# Altium footprint library custom-case.PcbLib: 483 footprints (part 13 of 31)
Each footprint in its own frame and in the unit in brackets; x right, y up, seen from the top. Pads: shape width x height; smd on the part's side, far side on the other; paste and mask are expansions set on the pad; w line width, h text height; cw(c..) or ccw(c..) is an arc to the next point about the centre after c.
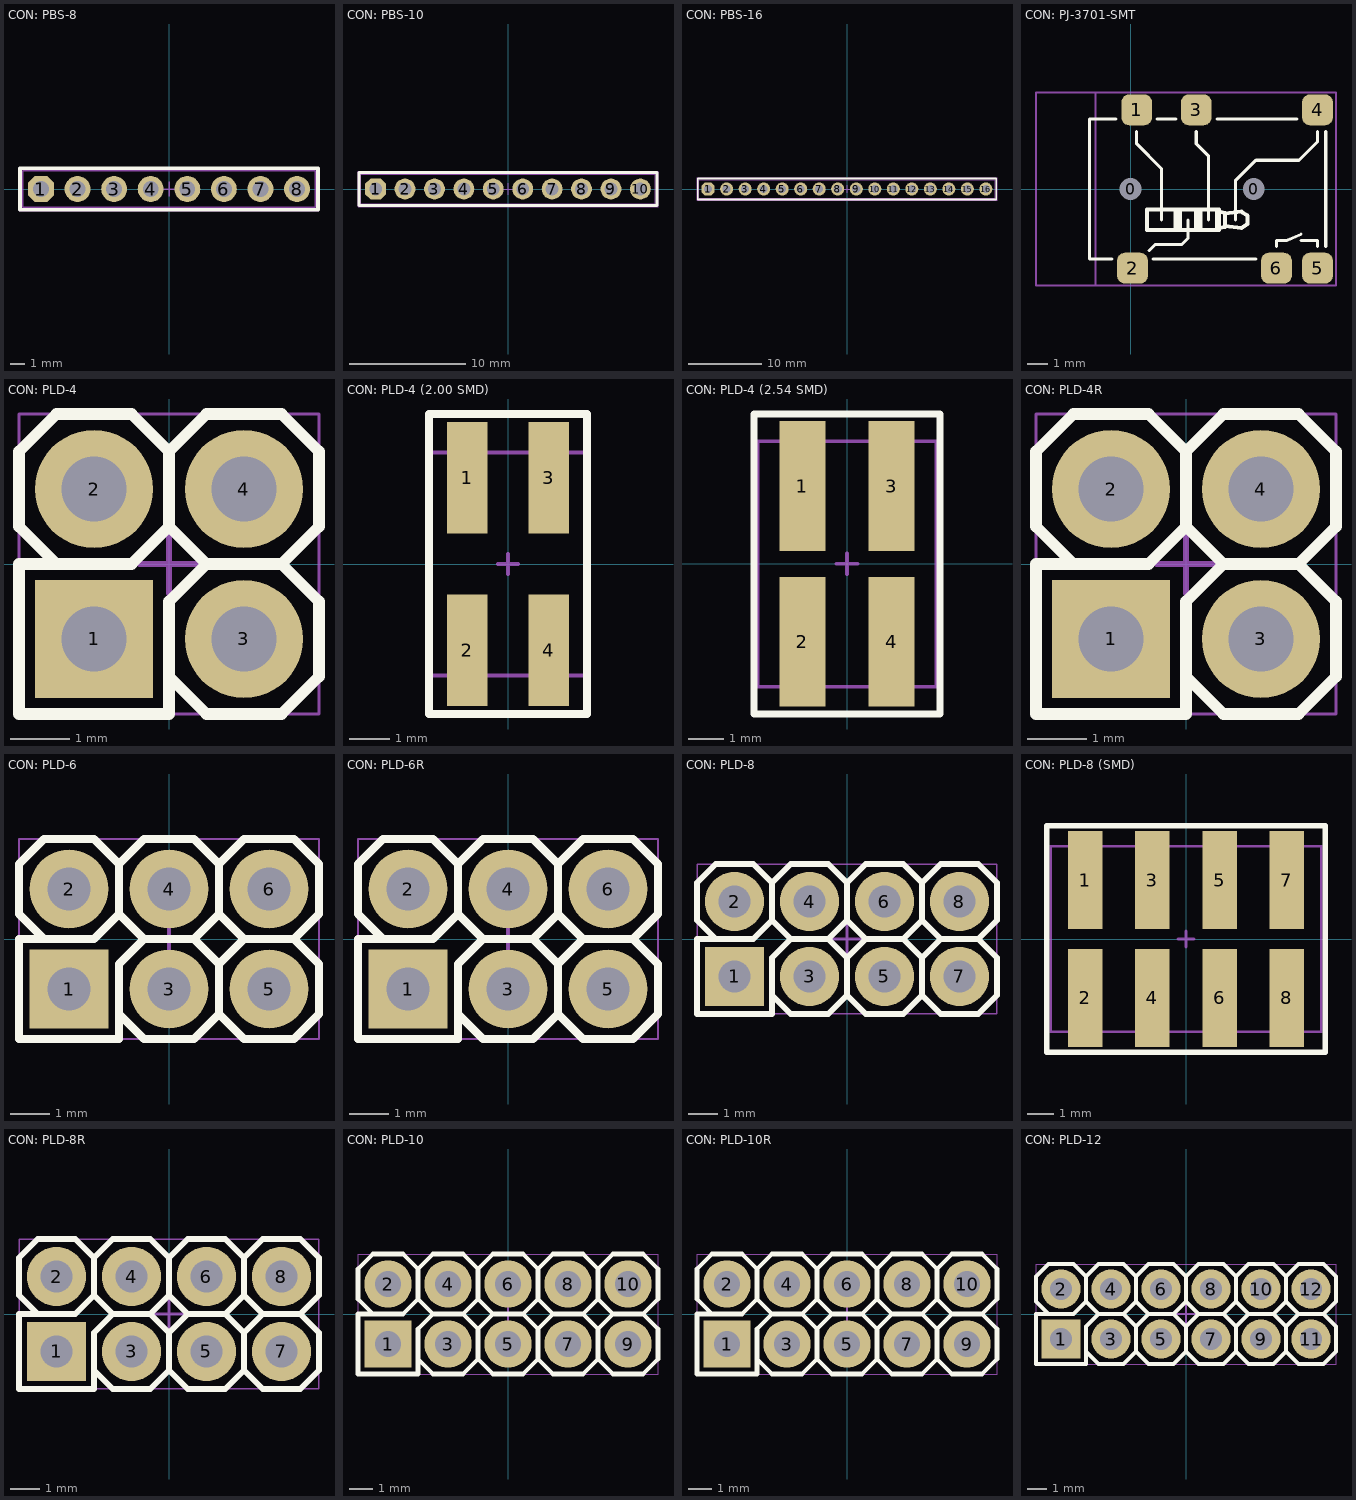
[diagram p12: the footprints below, top view; thin cyan lines are the x and y axes]

## CON: PBS-8 [mm] "PBS-8"
height 10
pads (8):
  oct 1.8x1.8 hole 1.1: 1(-8.89,0)
  round 1.8 hole 1.1: 2(-6.35,0) 3(-3.81,0) 4(-1.27,0) 5(1.27,0) 6(3.81,0) 7(6.35,0) 8(8.89,0)
Top Overlay:
  lines w0.254: -10.35,-1.45 10.35,-1.45 10.35,1.45 -10.35,1.45 -10.35,-1.45
Top Assy:
  lines w0.1: -10.16,-1.27 10.16,-1.27 10.16,1.27 -10.16,1.27 -10.16,-1.27
Size Area:
  lines w0.05: -10.414,-1.524 -10.414,1.524 10.414,1.524 10.414,-1.524 -10.414,-1.524
  lines w0.1: -0.5,0 0.5,0 ; 0,-0.5 0,0.5
3D body "User Library-PBS-08.STEP": height 8.4, standoff -3.2, extent -10.16,-1.27 10.16,1.27

## CON: PBS-10 [mm] "PBS-10"
height 8.5
pads (10):
  oct 1.8x1.8 hole 1.1: 1(-11.43,0)
  round 1.8 hole 1.1: 2(-8.89,0) 3(-6.35,0) 4(-3.81,0) 5(-1.27,0) 6(1.27,0) 7(3.81,0) 8(6.35,0) 9(8.89,0) 10(11.43,0)
Top Overlay:
  lines w0.254: -12.875,-1.425 12.875,-1.425 12.875,1.425 -12.875,1.425 -12.875,-1.425
Top Assy:
  lines w0.1: -12.7,-1.27 -12.7,1.27 12.7,1.27 12.7,-1.27 -12.7,-1.27
Size Area:
  lines w0.05: -12.954,-1.524 12.954,-1.524 12.954,1.524 -12.954,1.524 -12.954,-1.524
  lines w0.1: -0.5,0 0.5,0 ; 0,-0.5 0,0.5
3D body "User Library-PBS-10.STEP": height 8.4, standoff -3.2, extent -12.7,-1.27 12.7,1.27

## CON: PBS-16 [mm] "PBS-16"
height 10
pads (16):
  oct 1.8x1.8 hole 1.1: 1(-19.05,0)
  round 1.8 hole 1.1: 2(-16.51,0) 3(-13.97,0) 4(-11.43,0) 5(-8.89,0) 6(-6.35,0) 7(-3.81,0) 8(-1.27,0) 9(1.27,0) 10(3.81,0) 11(6.35,0) 12(8.89,0) 13(11.43,0) 14(13.97,0) 15(16.51,0) 16(19.05,0)
Top Overlay:
  lines w0.254: -20.475,-1.425 20.475,-1.425 20.475,1.425 -20.475,1.425 -20.475,-1.425
Top Assy:
  lines w0.1: -20.32,-1.27 -20.32,1.27 20.32,1.27 20.32,-1.27 -20.32,-1.27
Size Area:
  lines w0.05: -20.574,-1.524 20.574,-1.524 20.574,1.524 -20.574,1.524 -20.574,-1.524
  lines w0.1: -0.5,0 0.5,0 ; 0,-0.5 0,0.5
3D body "User Library-pbs-16.STEP": height 8.27, standoff -2.73, extent -20.32,-1.27 20.32,1.27

## CON: PJ-3701-SMT [mm] "Mini Jack"
pads (8):
  round 1 hole 1.05 unplated: 0(0,0) 0(6,0)
  rrect50% 1.5x1.5 smd: 1(0.3,3.85) 2(0.1,-3.85) 3(3.2,3.85) 4(9.1,3.85) 5(9.1,-3.85) 6(7.1,-3.85)
Top Overlay:
  lines w0.15: -0.9,-3.4 -2,-3.4 -2,3.4 -0.7,3.4 ; 0.3,2.8 0.3,2.2 1.5,1 1.5,-1.5 ; 0.9,-3 1.2,-2.7 2.5,-2.7 2.8,-2.4 ; 1.1,-3.4 6.1,-3.4 ; 1.3,3.4 2.2,3.4 ; 2.8,-1.5 2.8,-2.4 ; 3.2,2.8 3.2,2.2 3.8,1.6 3.8,-1.5 ; 4.2,3.4 8.1,3.4 ; 5.1,-1.5 5.1,0.4 6.1,1.4 8.2,1.4 9.1,2.3 9.1,2.8 ; 7.1,-2.8 7.1,-2.5 7.6,-2.5 8.3,-2.2 ; 8.3,-2.5 9.1,-2.5 9.1,-2.8 ; 9.5,-2.8 9.5,2.8 ; 2.8,-2.4 2.8,-2.4
  lines w0.2: 2.2,-2 2.2,-1 ; 2.4,-2 2.4,-1 ; 3.2,-2 3.2,-1 ; 3.4,-2 3.4,-1 ; 4.2,-2 4.2,-1 ; 4.3,-1.9 4.6,-1.84 4.6,-1.16 4.3,-1.1 4.3,-2 3.3,-2 ; 4.3,-1 3.3,-1 ; 4.6,-1.8 5.4,-1.9 5.7,-1.7 5.7,-1.3 5.4,-1.1 4.6,-1.2 ; 2.3,-2 3.3,-2 ; 2.3,-2 2.3,-1 ; 2.3,-2 0.8,-2 0.8,-1 2.3,-1 ; 2.3,-1 3.3,-1 ; 3.3,-2 3.3,-1
3D model:
  lines w0.1: -1.7,-4.7 -1.7,4.7 10,4.7 10,-4.7 -1.7,-4.7
Size Area:
  lines w0.1: -4.6,-4.7 10,-4.7 10,4.7 -4.6,4.7 -4.6,-4.7
3D body "PJ-3701-SMT.STEP": height 4.7, standoff -0.6, extent -4.6,-4.17 9.5,4.23

## CON: PLD-4 [mm]
height 10
pads (4):
  rect 2x2 hole 1.1: 1(-1.27,-1.27)
  round 2 hole 1.1: 2(-1.27,1.27) 3(1.27,-1.27) 4(1.27,1.27)
Top Overlay:
  lines w0.2: -1.905,0 -2.54,0.635 -2.54,1.905 -1.905,2.54 ; 0,-1.905 0.635,-2.54 1.905,-2.54 2.54,-1.905 2.54,-0.635 1.905,0 ; -1.905,2.54 -0.635,2.54 ; -1.905,2.54 -0.635,2.54 ; -1.905,2.54 -0.635,2.54 ; -0.635,2.54 0,1.905 ; 0,0.635 0.635,0 ; 0,0.635 0,1.905 ; 0,0.635 -0.635,0 -2.54,0 -2.54,-2.54 0,-2.54 0,-0.635 0.635,0 ; 0,1.905 0.635,2.54 ; 0.635,0 1.905,0 ; 0.635,2.54 1.905,2.54 ; 0.635,2.54 1.905,2.54 ; 1.905,0 2.54,0.635 2.54,1.905 1.905,2.54
Top Assy:
  lines w0.1: -1.905,0 -2.54,0.635 -2.54,1.905 -1.905,2.54 -0.635,2.54 0,1.905 0.635,2.54 1.905,2.54 2.54,1.905 2.54,0.635 1.905,0 ; 0,-1.905 0.635,-2.54 1.905,-2.54 2.54,-1.905 2.54,-0.635 1.905,0 ; 0.635,0 0,-0.635 0,-2.54 -2.54,-2.54 -2.54,0 -0.635,0 0,0.635 0.635,0 ; 0.635,0 1.905,0
Size Area:
  lines w0.05: -2.54,-2.54 -2.54,2.54 2.54,2.54 2.54,-2.54 -2.54,-2.54
  lines w0.1: -0.5,0 0.5,0 ; 0,-0.5 0,0.5
3D body "PLD-4.STEP": height 8.54, standoff -3, extent -2.592,-2.546 2.488,2.534

## CON: PLD-4 (2.00 SMD) [mm]
pads (4):
  rect 1x2.75 smd: 1(-1,2.125) 2(-1,-2.125) 3(1,2.125) 4(1,-2.125)
Top Overlay:
  lines w0.2: -1.95,-3.7 -1.95,3.7 1.95,3.7 1.95,-3.7 -1.95,-3.7
Top Assy:
  lines w0.1: -1.95,-2.75 -1.95,2.75 1.95,2.75 1.95,-2.75 -1.95,-2.75
Size Area:
  lines w0.1: -0.25,0 0.25,0 ; 0,-0.25 0,0.25 ; -1.95,-3.7 1.95,-3.7 1.95,3.7 -1.95,3.7 -1.95,-3.7
3D body "877590464-1.STEP": height 6.5, standoff 0, extent -1.95,-2.75 1.95,2.75

## CON: PLD-4 (2.54 SMD) [mm]
pads (4):
  rect 1.3x3.7 smd: 1(-1.27,2.22) 2(-1.27,-2.22) 3(1.27,2.22) 4(1.27,-2.22)
Top Overlay:
  lines w0.2: -2.65,-4.275 2.65,-4.275 2.65,4.275 -2.65,4.275 -2.65,-4.275
Top Assy:
  lines w0.1: -2.55,-3.5 -2.55,3.5 2.55,3.5 2.55,-3.5 -2.55,-3.5
Size Area:
  lines w0.1: -0.3,0 0.3,0 ; 0,-0.3 0,0.3 ; -2.65,-4.278 -2.65,4.275 2.65,4.275 2.65,-4.253 -2.65,-4.278
3D body "015912040-1.STEP": height 9.64, standoff -0.01, extent -2.54,-3.492 2.54,3.493

## CON: PLD-4R [mm]
height 10
pads (4):
  rect 2x2 hole 1.1: 1(-1.27,-1.27)
  round 2 hole 1.1: 2(-1.27,1.27) 3(1.27,-1.27) 4(1.27,1.27)
Top Overlay:
  lines w0.2: -1.905,0 -2.54,0.635 -2.54,1.905 -1.905,2.54 ; 0,-1.905 0.635,-2.54 1.905,-2.54 2.54,-1.905 2.54,-0.635 1.905,0 ; -1.905,2.54 -0.635,2.54 ; -1.905,2.54 -0.635,2.54 ; -1.905,2.54 -0.635,2.54 ; -0.635,2.54 0,1.905 ; 0,0.635 0.635,0 ; 0,0.635 0,1.905 ; 0,0.635 -0.635,0 -2.54,0 -2.54,-2.54 0,-2.54 0,-0.635 0.635,0 ; 0,1.905 0.635,2.54 ; 0.635,0 1.905,0 ; 0.635,2.54 1.905,2.54 ; 0.635,2.54 1.905,2.54 ; 1.905,0 2.54,0.635 2.54,1.905 1.905,2.54
Top Assy:
  lines w0.1: -1.905,0 -2.54,0.635 -2.54,1.905 -1.905,2.54 -0.635,2.54 0,1.905 0.635,2.54 1.905,2.54 2.54,1.905 2.54,0.635 1.905,0 ; 0,-1.905 0.635,-2.54 1.905,-2.54 2.54,-1.905 2.54,-0.635 1.905,0 ; 0.635,0 0,-0.635 0,-2.54 -2.54,-2.54 -2.54,0 -0.635,0 0,0.635 0.635,0 ; 0.635,0 1.905,0
Size Area:
  lines w0.05: -2.54,-2.54 -2.54,2.54 2.54,2.54 2.54,-2.54 -2.54,-2.54
  lines w0.1: -0.5,0 0.5,0 ; 0,-0.5 0,0.5
3D body "2x2 Male Pin Header Angle.STEP": height 5.1, standoff -2.9, extent -2.54,-1.61 2.545,13.29

## CON: PLD-6 [mm]
height 10
pads (6):
  rect 2x2 hole 1.1: 1(-2.54,-1.27)
  round 2 hole 1.1: 2(-2.54,1.27) 3(0,-1.27) 4(0,1.27) 5(2.54,-1.27) 6(2.54,1.27)
Top Overlay:
  lines w0.2: -3.175,0 -3.81,0.635 -3.81,1.905 -3.175,2.54 ; -1.27,-1.905 -0.635,-2.54 0.635,-2.54 1.27,-1.905 ; -3.175,2.54 -1.905,2.54 ; -3.175,2.54 -1.905,2.54 ; -3.175,2.54 -1.905,2.54 ; -1.905,2.54 -1.27,1.905 ; -1.27,0.635 -1.27,1.905 ; -1.27,0.635 -1.905,0 -3.81,0 -3.81,-2.54 -1.27,-2.54 -1.27,-0.635 -0.635,0 ; -1.27,0.635 -0.635,0 ; -1.27,1.905 -0.635,2.54 ; -0.635,0 0.635,0 ; -0.635,2.54 0.635,2.54 ; -0.635,2.54 0.635,2.54 ; 0.635,0 1.27,0.635 ; 0.635,0 1.27,-0.635 ; 0.635,2.54 1.27,1.905 ; 1.27,-1.905 1.905,-2.54 3.175,-2.54 3.81,-1.905 3.81,-0.635 3.175,0 ; 1.27,-1.905 1.27,-0.635 ; 1.27,-0.635 1.905,0 ; 1.27,0.635 1.27,1.905 ; 1.27,0.635 1.905,0 ; 1.27,1.905 1.905,2.54 ; 1.905,0 3.175,0 ; 1.905,2.54 3.175,2.54 ; 1.905,2.54 3.175,2.54 ; 3.175,0 3.81,0.635 3.81,1.905 3.175,2.54
Top Assy:
  lines w0.1: -3.175,0 -3.81,0.635 -3.81,1.905 -3.175,2.54 -1.905,2.54 -1.27,1.905 -0.635,2.54 0.635,2.54 1.27,1.905 ; -1.27,-1.905 -0.635,-2.54 0.635,-2.54 1.27,-1.905 ; -0.635,0 0.635,0 ; -0.635,0 -1.27,0.635 -1.905,0 -3.81,0 -3.81,-2.54 -1.27,-2.54 -1.27,-0.635 -0.635,0 ; 0.635,0 1.27,0.635 ; 0.635,0 1.27,-0.635 ; 1.27,-1.905 1.905,-2.54 3.175,-2.54 3.81,-1.905 3.81,-0.635 3.175,0 ; 1.27,-1.905 1.27,-0.635 ; 1.27,-0.635 1.905,0 ; 1.27,0.635 1.905,0 ; 1.27,0.635 1.27,1.905 ; 1.27,1.905 1.905,2.54 3.175,2.54 3.81,1.905 3.81,0.635 3.175,0 ; 1.905,0 3.175,0
Size Area:
  lines w0.05: -3.81,-2.54 3.81,-2.54 3.81,2.54 -3.81,2.54 -3.81,-2.54
  lines w0.1: -0.5,0 0.5,0 ; 0,-0.5 0,0.5
3D body "PLD-6.STEP": height 8.54, standoff -3, extent -3.81,-2.54 3.81,2.54

## CON: PLD-6R [mm]
height 10
pads (6):
  rect 2x2 hole 1.1: 1(-2.54,-1.27)
  round 2 hole 1.1: 2(-2.54,1.27) 3(0,-1.27) 4(0,1.27) 5(2.54,-1.27) 6(2.54,1.27)
Top Overlay:
  lines w0.2: -3.175,0 -3.81,0.635 -3.81,1.905 -3.175,2.54 ; -1.27,-1.905 -0.635,-2.54 0.635,-2.54 1.27,-1.905 ; -3.175,2.54 -1.905,2.54 ; -3.175,2.54 -1.905,2.54 ; -3.175,2.54 -1.905,2.54 ; -1.905,2.54 -1.27,1.905 ; -1.27,0.635 -1.27,1.905 ; -1.27,0.635 -1.905,0 -3.81,0 -3.81,-2.54 -1.27,-2.54 -1.27,-0.635 -0.635,0 ; -1.27,0.635 -0.635,0 ; -1.27,1.905 -0.635,2.54 ; -0.635,0 0.635,0 ; -0.635,2.54 0.635,2.54 ; -0.635,2.54 0.635,2.54 ; 0.635,0 1.27,0.635 ; 0.635,0 1.27,-0.635 ; 0.635,2.54 1.27,1.905 ; 1.27,-1.905 1.905,-2.54 3.175,-2.54 3.81,-1.905 3.81,-0.635 3.175,0 ; 1.27,-1.905 1.27,-0.635 ; 1.27,-0.635 1.905,0 ; 1.27,0.635 1.27,1.905 ; 1.27,0.635 1.905,0 ; 1.27,1.905 1.905,2.54 ; 1.905,0 3.175,0 ; 1.905,2.54 3.175,2.54 ; 1.905,2.54 3.175,2.54 ; 3.175,0 3.81,0.635 3.81,1.905 3.175,2.54
Top Assy:
  lines w0.1: -3.175,0 -3.81,0.635 -3.81,1.905 -3.175,2.54 -1.905,2.54 -1.27,1.905 -0.635,2.54 0.635,2.54 1.27,1.905 ; -1.27,-1.905 -0.635,-2.54 0.635,-2.54 1.27,-1.905 ; -0.635,0 0.635,0 ; -0.635,0 -1.27,0.635 -1.905,0 -3.81,0 -3.81,-2.54 -1.27,-2.54 -1.27,-0.635 -0.635,0 ; 0.635,0 1.27,0.635 ; 0.635,0 1.27,-0.635 ; 1.27,-1.905 1.905,-2.54 3.175,-2.54 3.81,-1.905 3.81,-0.635 3.175,0 ; 1.27,-1.905 1.27,-0.635 ; 1.27,-0.635 1.905,0 ; 1.27,0.635 1.905,0 ; 1.27,0.635 1.27,1.905 ; 1.27,1.905 1.905,2.54 3.175,2.54 3.81,1.905 3.81,0.635 3.175,0 ; 1.905,0 3.175,0
Size Area:
  lines w0.05: -3.81,-2.54 3.81,-2.54 3.81,2.54 -3.81,2.54 -3.81,-2.54
  lines w0.1: -0.5,0 0.5,0 ; 0,-0.5 0,0.5
3D body "2x3 Male Pin Header Angle.STEP": height 5.1, standoff -2.9, extent -3.81,-1.61 3.815,13.29

## CON: PLD-8 [mm] "PLD-40 8 pin header"
height 10
pads (8):
  rect 2x2 hole 1.1: 1(-3.81,-1.27)
  round 2 hole 1.1: 2(-3.81,1.27) 3(-1.27,-1.27) 4(-1.27,1.27) 5(1.27,-1.27) 6(1.27,1.27) 7(3.81,-1.27) 8(3.81,1.27)
Top Overlay:
  lines w0.2: -4.445,0 -5.08,0.635 -5.08,1.905 -4.445,2.54 ; -2.54,-1.905 -1.905,-2.54 -0.635,-2.54 0,-1.905 ; -4.445,2.54 -3.175,2.54 ; -4.445,2.54 -3.175,2.54 ; -3.175,2.54 -2.54,1.905 ; -2.54,0.635 -1.905,0 ; -2.54,0.635 -3.175,0 -5.08,0 -5.08,-2.54 -2.54,-2.54 -2.54,-0.635 -1.905,0 ; -2.54,0.635 -2.54,1.905 ; -2.54,1.905 -1.905,2.54 ; -1.905,0 -0.635,0 ; -1.905,2.54 -0.635,2.54 ; -1.905,2.54 -0.635,2.54 ; -0.635,0 0,0.635 ; -0.635,0 0,-0.635 ; -0.635,2.54 0,1.905 ; 0,-1.905 0.635,-2.54 1.905,-2.54 2.54,-1.905 ; 0,-1.905 0,-0.635 ; 0,-0.635 0.635,0 ; 0,0.635 0,1.905 ; 0,0.635 0.635,0 ; 0,1.905 0.635,2.54 ; 0.635,0 1.905,0 ; 0.635,2.54 1.905,2.54 ; 0.635,2.54 1.905,2.54 ; 1.905,0 2.54,0.635 ; 1.905,0 2.54,-0.635 ; 1.905,2.54 2.54,1.905 ; 2.54,-1.905 3.175,-2.54 4.445,-2.54 5.08,-1.905 5.08,-0.635 4.445,0 ; 2.54,-1.905 2.54,-0.635 ; 2.54,-0.635 3.175,0 ; 2.54,0.635 2.54,1.905 ; 2.54,0.635 3.175,0 ; 2.54,1.905 3.175,2.54 ; 3.175,0 4.445,0 ; 3.175,2.54 4.445,2.54 ; 3.175,2.54 4.445,2.54 ; 4.445,0 5.08,0.635 5.08,1.905 4.445,2.54
Top Assy:
  lines w0.1: -4.445,0 -5.08,0.635 -5.08,1.905 -4.445,2.54 -3.175,2.54 -2.54,1.905 -1.905,2.54 -0.635,2.54 0,1.905 ; -2.54,-1.905 -1.905,-2.54 -0.635,-2.54 0,-1.905 ; -1.905,0 -2.54,-0.635 -2.54,-2.54 -5.08,-2.54 -5.08,0 -3.175,0 -2.54,0.635 -1.905,0 ; -1.905,0 -0.635,0 ; -0.635,0 0,-0.635 ; -0.635,0 0,0.635 ; 0,-1.905 0.635,-2.54 1.905,-2.54 2.54,-1.905 ; 0,-1.905 0,-0.635 ; 0,-0.635 0.635,0 ; 0,0.635 0.635,0 ; 0,0.635 0,1.905 ; 0,1.905 0.635,2.54 1.905,2.54 2.54,1.905 ; 0.635,0 1.905,0 ; 1.905,0 2.54,-0.635 ; 1.905,0 2.54,0.635 ; 2.54,-1.905 3.175,-2.54 4.445,-2.54 5.08,-1.905 5.08,-0.635 4.445,0 ; 2.54,-1.905 2.54,-0.635 ; 2.54,-0.635 3.175,0 ; 2.54,0.635 3.175,0 ; 2.54,0.635 2.54,1.905 ; 2.54,1.905 3.175,2.54 4.445,2.54 5.08,1.905 5.08,0.635 4.445,0 ; 3.175,0 4.445,0
Size Area:
  lines w0.05: -5.08,-2.54 -5.08,2.54 5.08,2.54 5.08,-2.54 -5.08,-2.54
  lines w0.1: -0.5,0 0.5,0 ; 0,-0.5 0,0.5
3D body "PLD-8.STEP": height 8.54, standoff -3, extent -5.132,-2.546 5.028,2.534

## CON: PLD-8 (SMD) [mm]
pads (8):
  rect 1.3x3.7 smd: 1(-3.81,2.22) 2(-3.81,-2.22) 3(-1.27,2.22) 4(-1.27,-2.22) 5(1.27,2.22) 6(1.27,-2.22) 7(3.81,2.22) 8(3.81,-2.22)
Top Overlay:
  lines w0.2: -5.25,-4.275 -5.25,4.275 5.25,4.275 5.25,-4.275 -5.25,-4.275
3D model:
  lines w0.1: -5.1,-3.5 -5.1,3.5 5.1,3.5 5.1,-3.5 -5.1,-3.5
Size Area:
  lines w0.1: -0.3,0 0.3,0 ; 0,-0.3 0,0.3 ; -5.25,-4.275 -5.25,4.275 5.25,4.275 5.25,-4.275 -5.25,-4.275
3D body "015910080-1.STEP": height 9.64, standoff -0.01, extent -5.08,-3.493 5.08,3.493

## CON: PLD-8R [mm] "PLD-40 8 pin header"
height 10
pads (8):
  rect 2x2 hole 1.1: 1(-3.81,-1.27)
  round 2 hole 1.1: 2(-3.81,1.27) 3(-1.27,-1.27) 4(-1.27,1.27) 5(1.27,-1.27) 6(1.27,1.27) 7(3.81,-1.27) 8(3.81,1.27)
Top Overlay:
  lines w0.2: -4.445,0 -5.08,0.635 -5.08,1.905 -4.445,2.54 ; -2.54,-1.905 -1.905,-2.54 -0.635,-2.54 0,-1.905 ; -4.445,2.54 -3.175,2.54 ; -4.445,2.54 -3.175,2.54 ; -3.175,2.54 -2.54,1.905 ; -2.54,0.635 -1.905,0 ; -2.54,0.635 -3.175,0 -5.08,0 -5.08,-2.54 -2.54,-2.54 -2.54,-0.635 -1.905,0 ; -2.54,0.635 -2.54,1.905 ; -2.54,1.905 -1.905,2.54 ; -1.905,0 -0.635,0 ; -1.905,2.54 -0.635,2.54 ; -1.905,2.54 -0.635,2.54 ; -0.635,0 0,0.635 ; -0.635,0 0,-0.635 ; -0.635,2.54 0,1.905 ; 0,-1.905 0.635,-2.54 1.905,-2.54 2.54,-1.905 ; 0,-1.905 0,-0.635 ; 0,-0.635 0.635,0 ; 0,0.635 0,1.905 ; 0,0.635 0.635,0 ; 0,1.905 0.635,2.54 ; 0.635,0 1.905,0 ; 0.635,2.54 1.905,2.54 ; 0.635,2.54 1.905,2.54 ; 1.905,0 2.54,0.635 ; 1.905,0 2.54,-0.635 ; 1.905,2.54 2.54,1.905 ; 2.54,-1.905 3.175,-2.54 4.445,-2.54 5.08,-1.905 5.08,-0.635 4.445,0 ; 2.54,-1.905 2.54,-0.635 ; 2.54,-0.635 3.175,0 ; 2.54,0.635 2.54,1.905 ; 2.54,0.635 3.175,0 ; 2.54,1.905 3.175,2.54 ; 3.175,0 4.445,0 ; 3.175,2.54 4.445,2.54 ; 3.175,2.54 4.445,2.54 ; 4.445,0 5.08,0.635 5.08,1.905 4.445,2.54
Top Assy:
  lines w0.1: -4.445,0 -5.08,0.635 -5.08,1.905 -4.445,2.54 -3.175,2.54 -2.54,1.905 -1.905,2.54 -0.635,2.54 0,1.905 ; -2.54,-1.905 -1.905,-2.54 -0.635,-2.54 0,-1.905 ; -1.905,0 -2.54,-0.635 -2.54,-2.54 -5.08,-2.54 -5.08,0 -3.175,0 -2.54,0.635 -1.905,0 ; -1.905,0 -0.635,0 ; -0.635,0 0,-0.635 ; -0.635,0 0,0.635 ; 0,-1.905 0.635,-2.54 1.905,-2.54 2.54,-1.905 ; 0,-1.905 0,-0.635 ; 0,-0.635 0.635,0 ; 0,0.635 0.635,0 ; 0,0.635 0,1.905 ; 0,1.905 0.635,2.54 1.905,2.54 2.54,1.905 ; 0.635,0 1.905,0 ; 1.905,0 2.54,-0.635 ; 1.905,0 2.54,0.635 ; 2.54,-1.905 3.175,-2.54 4.445,-2.54 5.08,-1.905 5.08,-0.635 4.445,0 ; 2.54,-1.905 2.54,-0.635 ; 2.54,-0.635 3.175,0 ; 2.54,0.635 3.175,0 ; 2.54,0.635 2.54,1.905 ; 2.54,1.905 3.175,2.54 4.445,2.54 5.08,1.905 5.08,0.635 4.445,0 ; 3.175,0 4.445,0
Size Area:
  lines w0.05: -5.08,-2.54 -5.08,2.54 5.08,2.54 5.08,-2.54 -5.08,-2.54
  lines w0.1: -0.5,0 0.5,0 ; 0,-0.5 0,0.5
3D body "2x4 Male Pin Header Angle.STEP": height 5.1, standoff -2.9, extent -5.08,-1.61 5.085,13.29

## CON: PLD-10 [mm]
height 10
pads (10):
  rect 2x2 hole 1.1: 1(-5.08,-1.27)
  round 2 hole 1.1: 2(-5.08,1.27) 3(-2.54,-1.27) 4(-2.54,1.27) 5(0,-1.27) 6(0,1.27) 7(2.54,-1.27) 8(2.54,1.27) 9(5.08,-1.27) 10(5.08,1.27)
Top Overlay:
  lines w0.2: -5.715,0 -6.35,0.635 -6.35,1.905 -5.715,2.54 ; -3.81,-1.905 -3.175,-2.54 -1.905,-2.54 -1.27,-1.905 ; -5.715,2.54 -4.445,2.54 ; -5.715,2.54 -4.445,2.54 ; -4.445,2.54 -3.81,1.905 ; -3.81,0.635 -3.81,1.905 ; -3.81,0.635 -4.445,0 -6.35,0 -6.35,-2.54 -3.81,-2.54 -3.81,-0.635 -3.175,0 ; -3.81,0.635 -3.175,0 ; -3.81,1.905 -3.175,2.54 ; -3.175,0 -1.905,0 ; -3.175,2.54 -1.905,2.54 ; -3.175,2.54 -1.905,2.54 ; -1.905,0 -1.27,-0.635 ; -1.905,0 -1.27,0.635 ; -1.905,2.54 -1.27,1.905 ; -1.27,-1.905 -0.635,-2.54 0.635,-2.54 1.27,-1.905 ; -1.27,-1.905 -1.27,-0.635 ; -1.27,-0.635 -0.635,0 ; -1.27,0.635 -1.27,1.905 ; -1.27,0.635 -0.635,0 ; -1.27,1.905 -0.635,2.54 ; -0.635,0 0.635,0 ; -0.635,2.54 0.635,2.54 ; -0.635,2.54 0.635,2.54 ; 0.635,0 1.27,-0.635 ; 0.635,0 1.27,0.635 ; 0.635,2.54 1.27,1.905 ; 1.27,-1.905 1.905,-2.54 3.175,-2.54 3.81,-1.905 ; 1.27,-1.905 1.27,-0.635 ; 1.27,-0.635 1.905,0 ; 1.27,0.635 1.27,1.905 ; 1.27,0.635 1.905,0 ; 1.27,1.905 1.905,2.54 ; 1.905,0 3.175,0 ; 1.905,2.54 3.175,2.54 ; 1.905,2.54 3.175,2.54 ; 3.175,0 3.81,-0.635 ; 3.175,0 3.81,0.635 ; 3.175,2.54 3.81,1.905 ; 3.81,-1.905 3.81,-0.635 ; 3.81,-1.905 4.445,-2.54 5.715,-2.54 6.35,-1.905 6.35,-0.635 5.715,0 ; 3.81,-0.635 4.445,0 ; 3.81,0.635 4.445,0 ; 3.81,0.635 3.81,1.905 ; 3.81,1.905 4.445,2.54 ; 4.445,0 5.715,0 ; 4.445,2.54 5.715,2.54 ; 4.445,2.54 5.715,2.54 ; 5.715,0 6.35,0.635 6.35,1.905 5.715,2.54
Top Assy:
  lines w0.1: -5.715,0 -6.35,0.635 -6.35,1.905 -5.715,2.54 -4.445,2.54 -3.81,1.905 -3.175,2.54 -1.905,2.54 -1.27,1.905 ; -3.81,-1.905 -3.175,-2.54 -1.905,-2.54 -1.27,-1.905 ; -3.175,0 -1.905,0 ; -3.175,0 -3.81,0.635 -4.445,0 -6.35,0 -6.35,-2.54 -3.81,-2.54 -3.81,-0.635 -3.175,0 ; -1.905,0 -1.27,0.635 ; -1.905,0 -1.27,-0.635 ; -1.27,-1.905 -0.635,-2.54 0.635,-2.54 1.27,-1.905 ; -1.27,-1.905 -1.27,-0.635 ; -1.27,-0.635 -0.635,0 ; -1.27,0.635 -0.635,0 ; -1.27,0.635 -1.27,1.905 ; -1.27,1.905 -0.635,2.54 0.635,2.54 1.27,1.905 ; -0.635,0 0.635,0 ; 0.635,0 1.27,0.635 ; 0.635,0 1.27,-0.635 ; 1.27,-1.905 1.905,-2.54 3.175,-2.54 3.81,-1.905 ; 1.27,-1.905 1.27,-0.635 ; 1.27,-0.635 1.905,0 ; 1.27,0.635 1.905,0 ; 1.27,0.635 1.27,1.905 ; 1.27,1.905 1.905,2.54 3.175,2.54 3.81,1.905 ; 1.905,0 3.175,0 ; 3.175,0 3.81,0.635 ; 3.175,0 3.81,-0.635 ; 3.81,-1.905 4.445,-2.54 5.715,-2.54 6.35,-1.905 6.35,-0.635 5.715,0 ; 3.81,-1.905 3.81,-0.635 ; 3.81,-0.635 4.445,0 ; 3.81,0.635 4.445,0 ; 3.81,0.635 3.81,1.905 ; 3.81,1.905 4.445,2.54 5.715,2.54 6.35,1.905 6.35,0.635 5.715,0 ; 4.445,0 5.715,0
Size Area:
  lines w0.05: -6.35,-2.54 6.35,-2.54 6.35,2.54 -6.35,2.54 -6.35,-2.54
  lines w0.1: -0.5,0 0.5,0 ; 0,-0.5 0,0.5
3D body "PLD-10.STEP": height 8.54, standoff -3, extent -6.35,-2.54 6.35,2.54

## CON: PLD-10R [mm]
height 10
pads (10):
  rect 2x2 hole 1.1: 1(-5.08,-1.27)
  round 2 hole 1.1: 2(-5.08,1.27) 3(-2.54,-1.27) 4(-2.54,1.27) 5(0,-1.27) 6(0,1.27) 7(2.54,-1.27) 8(2.54,1.27) 9(5.08,-1.27) 10(5.08,1.27)
Top Overlay:
  lines w0.2: -5.715,0 -6.35,0.635 -6.35,1.905 -5.715,2.54 ; -3.81,-1.905 -3.175,-2.54 -1.905,-2.54 -1.27,-1.905 ; -5.715,2.54 -4.445,2.54 ; -5.715,2.54 -4.445,2.54 ; -4.445,2.54 -3.81,1.905 ; -3.81,0.635 -3.175,0 ; -3.81,0.635 -4.445,0 -6.35,0 -6.35,-2.54 -3.81,-2.54 -3.81,-0.635 -3.175,0 ; -3.81,0.635 -3.81,1.905 ; -3.81,1.905 -3.175,2.54 ; -3.175,0 -1.905,0 ; -3.175,2.54 -1.905,2.54 ; -3.175,2.54 -1.905,2.54 ; -1.905,0 -1.27,0.635 ; -1.905,0 -1.27,-0.635 ; -1.905,2.54 -1.27,1.905 ; -1.27,-1.905 -1.27,-0.635 ; -1.27,-1.905 -0.635,-2.54 0.635,-2.54 1.27,-1.905 ; -1.27,-0.635 -0.635,0 ; -1.27,0.635 -0.635,0 ; -1.27,0.635 -1.27,1.905 ; -1.27,1.905 -0.635,2.54 ; -0.635,0 0.635,0 ; -0.635,2.54 0.635,2.54 ; -0.635,2.54 0.635,2.54 ; 0.635,0 1.27,0.635 ; 0.635,0 1.27,-0.635 ; 0.635,2.54 1.27,1.905 ; 1.27,-1.905 1.27,-0.635 ; 1.27,-1.905 1.905,-2.54 3.175,-2.54 3.81,-1.905 ; 1.27,-0.635 1.905,0 ; 1.27,0.635 1.905,0 ; 1.27,0.635 1.27,1.905 ; 1.27,1.905 1.905,2.54 ; 1.905,0 3.175,0 ; 1.905,2.54 3.175,2.54 ; 1.905,2.54 3.175,2.54 ; 3.175,0 3.81,0.635 ; 3.175,0 3.81,-0.635 ; 3.175,2.54 3.81,1.905 ; 3.81,-1.905 4.445,-2.54 5.715,-2.54 6.35,-1.905 6.35,-0.635 5.715,0 ; 3.81,-1.905 3.81,-0.635 ; 3.81,-0.635 4.445,0 ; 3.81,0.635 3.81,1.905 ; 3.81,0.635 4.445,0 ; 3.81,1.905 4.445,2.54 ; 4.445,0 5.715,0 ; 4.445,2.54 5.715,2.54 ; 4.445,2.54 5.715,2.54 ; 5.715,0 6.35,0.635 6.35,1.905 5.715,2.54
Top Assy:
  lines w0.1: -5.715,0 -6.35,0.635 -6.35,1.905 -5.715,2.54 -4.445,2.54 -3.81,1.905 -3.175,2.54 -1.905,2.54 -1.27,1.905 ; -3.81,-1.905 -3.175,-2.54 -1.905,-2.54 -1.27,-1.905 ; -3.175,0 -3.81,-0.635 -3.81,-2.54 -6.35,-2.54 -6.35,0 -4.445,0 -3.81,0.635 -3.175,0 ; -3.175,0 -1.905,0 ; -1.905,0 -1.27,-0.635 ; -1.905,0 -1.27,0.635 ; -1.27,-1.905 -1.27,-0.635 ; -1.27,-1.905 -0.635,-2.54 0.635,-2.54 1.27,-1.905 ; -1.27,-0.635 -0.635,0 ; -1.27,0.635 -1.27,1.905 ; -1.27,0.635 -0.635,0 ; -1.27,1.905 -0.635,2.54 0.635,2.54 1.27,1.905 ; -0.635,0 0.635,0 ; 0.635,0 1.27,-0.635 ; 0.635,0 1.27,0.635 ; 1.27,-1.905 1.27,-0.635 ; 1.27,-1.905 1.905,-2.54 3.175,-2.54 3.81,-1.905 ; 1.27,-0.635 1.905,0 ; 1.27,0.635 1.27,1.905 ; 1.27,0.635 1.905,0 ; 1.27,1.905 1.905,2.54 3.175,2.54 3.81,1.905 ; 1.905,0 3.175,0 ; 3.175,0 3.81,-0.635 ; 3.175,0 3.81,0.635 ; 3.81,-1.905 3.81,-0.635 ; 3.81,-1.905 4.445,-2.54 5.715,-2.54 6.35,-1.905 6.35,-0.635 5.715,0 ; 3.81,-0.635 4.445,0 ; 3.81,0.635 3.81,1.905 ; 3.81,0.635 4.445,0 ; 3.81,1.905 4.445,2.54 5.715,2.54 6.35,1.905 6.35,0.635 5.715,0 ; 4.445,0 5.715,0
Size Area:
  lines w0.05: -6.35,-2.54 -6.35,2.54 6.35,2.54 6.35,-2.54 -6.35,-2.54
  lines w0.1: -0.5,0 0.5,0 ; 0,-0.5 0,0.5
3D body "2x5 Male Pin Header Angle.STEP": height 5.1, standoff -2.9, extent -6.35,-1.61 6.355,13.29

## CON: PLD-12 [mm]
height 10
pads (12):
  rect 2x2 hole 1.1: 1(-6.35,-1.27)
  round 2 hole 1.1: 2(-6.35,1.27) 3(-3.81,-1.27) 4(-3.81,1.27) 5(-1.27,-1.27) 6(-1.27,1.27) 7(1.27,-1.27) 8(1.27,1.27) 9(3.81,-1.27) 10(3.81,1.27) 11(6.35,-1.27) 12(6.35,1.27)
Top Overlay:
  lines w0.2: -5.08,-1.905 -4.445,-2.54 -3.175,-2.54 -2.54,-1.905 ; -7.62,0.635 -6.985,0 -7.62,0.635 ; -7.62,0.635 -7.62,1.905 -6.985,2.54 ; -6.985,2.54 -5.715,2.54 ; -6.985,2.54 -5.715,2.54 ; -5.715,0 -5.08,0.635 ; -5.715,0 -7.62,0 -7.62,-2.54 -5.08,-2.54 -5.08,-0.635 -4.445,0 ; -5.715,0 -5.08,0.635 ; -5.715,2.54 -5.08,1.905 ; -5.08,0.635 -4.445,0 ; -5.08,0.635 -5.08,1.905 ; -5.08,0.635 -4.445,0 ; -5.08,1.905 -4.445,2.54 ; -4.445,0 -3.175,0 ; -4.445,2.54 -3.175,2.54 ; -4.445,2.54 -3.175,2.54 ; -3.175,0 -2.54,-0.635 ; -3.175,0 -2.54,0.635 ; -3.175,2.54 -2.54,1.905 ; -2.54,-1.905 -2.54,-0.635 ; -2.54,-1.905 -1.905,-2.54 -0.635,-2.54 0,-1.905 ; -2.54,-0.635 -1.905,0 ; -2.54,0.635 -1.905,0 ; -2.54,0.635 -2.54,1.905 ; -2.54,1.905 -1.905,2.54 ; -1.905,0 -0.635,0 ; -1.905,2.54 -0.635,2.54 ; -1.905,2.54 -0.635,2.54 ; -0.635,0 0,-0.635 ; -0.635,0 0,0.635 ; -0.635,2.54 0,1.905 ; 0,-1.905 0,-0.635 ; 0,-1.905 0.635,-2.54 1.905,-2.54 2.54,-1.905 ; 0,-0.635 0.635,0 ; 0,0.635 0.635,0 ; 0,0.635 0,1.905 ; 0,1.905 0.635,2.54 ; 0.635,0 1.905,0 ; 0.635,2.54 1.905,2.54 ; 0.635,2.54 1.905,2.54 ; 1.905,0 2.54,-0.635 ; 1.905,0 2.54,0.635 ; 1.905,2.54 2.54,1.905 ; 2.54,-1.905 2.54,-0.635 ; 2.54,-1.905 3.175,-2.54 4.445,-2.54 5.08,-1.905 ; 2.54,-0.635 3.175,0 ; 2.54,0.635 3.175,0 ; 2.54,0.635 2.54,1.905 ; 2.54,1.905 3.175,2.54 ; 3.175,0 4.445,0 ; 3.175,2.54 4.445,2.54 ; 3.175,2.54 4.445,2.54 ; 4.445,0 5.08,-0.635 ; 4.445,0 5.08,0.635 ; 4.445,2.54 5.08,1.905 ; 5.08,-1.905 5.08,-0.635 ; 5.08,-1.905 5.715,-2.54 6.985,-2.54 7.62,-1.905 7.62,-0.635 6.985,0 ; 5.08,-0.635 5.715,0 ; 5.08,0.635 5.715,0 ; 5.08,0.635 5.08,1.905 ; 5.08,1.905 5.715,2.54 ; 5.715,0 6.985,0 ; 5.715,2.54 6.985,2.54 ; 5.715,2.54 6.985,2.54 ; 6.985,0 7.62,0.635 7.62,1.905 6.985,2.54
Top Assy:
  lines w0.1: -6.985,0 -7.62,0.635 -7.62,1.905 -6.985,2.54 -5.715,2.54 -5.08,1.905 -4.445,2.54 -3.175,2.54 -2.54,1.905 ; -5.08,-1.905 -4.445,-2.54 -3.175,-2.54 -2.54,-1.905 ; -4.445,0 -3.175,0 ; -4.445,0 -5.08,-0.635 -5.08,-2.54 -7.62,-2.54 -7.62,0 -5.715,0 -5.08,0.635 -4.445,0 ; -3.175,0 -2.54,-0.635 ; -3.175,0 -2.54,0.635 ; -2.54,-1.905 -1.905,-2.54 -0.635,-2.54 0,-1.905 ; -2.54,-1.905 -2.54,-0.635 ; -2.54,-0.635 -1.905,0 ; -2.54,0.635 -1.905,0 ; -2.54,0.635 -2.54,1.905 ; -2.54,1.905 -1.905,2.54 -0.635,2.54 0,1.905 ; -1.905,0 -0.635,0 ; -0.635,0 0,-0.635 ; -0.635,0 0,0.635 ; 0,-1.905 0.635,-2.54 1.905,-2.54 2.54,-1.905 ; 0,-1.905 0,-0.635 ; 0,-0.635 0.635,0 ; 0,0.635 0.635,0 ; 0,0.635 0,1.905 ; 0,1.905 0.635,2.54 1.905,2.54 2.54,1.905 ; 0.635,0 1.905,0 ; 1.905,0 2.54,-0.635 ; 1.905,0 2.54,0.635 ; 2.54,-1.905 3.175,-2.54 4.445,-2.54 5.08,-1.905 ; 2.54,-1.905 2.54,-0.635 ; 2.54,-0.635 3.175,0 ; 2.54,0.635 3.175,0 ; 2.54,0.635 2.54,1.905 ; 2.54,1.905 3.175,2.54 4.445,2.54 5.08,1.905 ; 3.175,0 4.445,0 ; 4.445,0 5.08,-0.635 ; 4.445,0 5.08,0.635 ; 5.08,-1.905 5.715,-2.54 6.985,-2.54 7.62,-1.905 7.62,-0.635 6.985,0 ; 5.08,-1.905 5.08,-0.635 ; 5.08,-0.635 5.715,0 ; 5.08,0.635 5.715,0 ; 5.08,0.635 5.08,1.905 ; 5.08,1.905 5.715,2.54 6.985,2.54 7.62,1.905 7.62,0.635 6.985,0 ; 5.715,0 6.985,0
Size Area:
  lines w0.05: -7.62,-2.54 7.62,-2.54 7.62,2.54 -7.62,2.54 -7.62,-2.54
  lines w0.1: -0.5,0 0.5,0 ; 0,-0.5 0,0.5
3D body "PLD-12.STEP": height 8.54, standoff -3, extent -7.62,-2.54 7.62,2.54